# Altium footprint library LFCG490.PcbLib: 1 footprints
Each footprint in its own frame and in the unit in brackets; x right, y up, seen from the top. Pads: shape width x height; smd on the part's side, far side on the other; paste and mask are expansions set on the pad; w line width, h text height; cw(c..) or ccw(c..) is an arc to the next point about the centre after c.
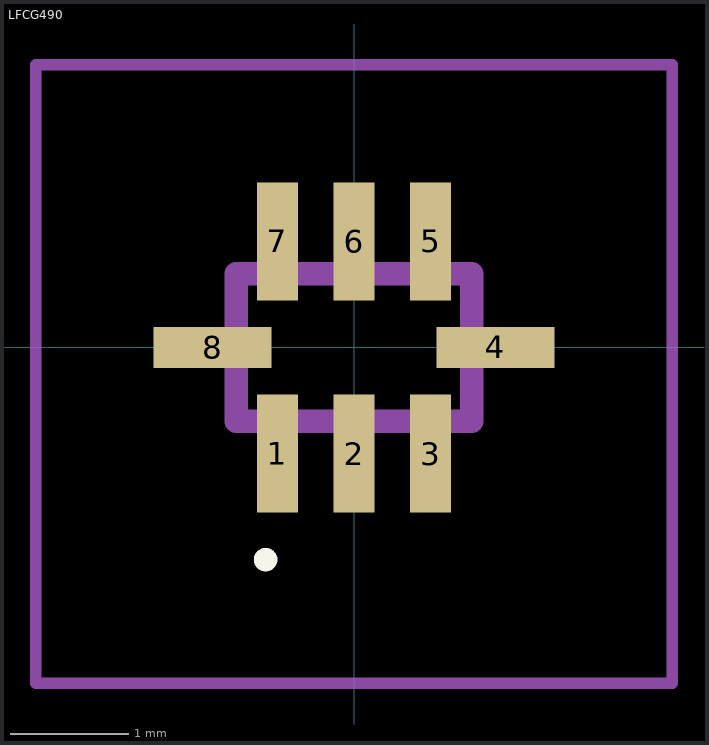
[diagram p0: the footprint, top view; thin cyan lines are the x and y axes]

## LFCG490 [mm]
pads (8):
  rect 0.35x1 smd: 1(-0.65,-0.9) 2(0,-0.9) 3(0.65,-0.9) 5(0.65,0.9) 6(0,0.9) 7(-0.65,0.9)
  rect 1x0.35 smd: 4(1.2,0) 8(-1.2,0)
Top Overlay:
  lines w0.1: -0.8,-1.8 -0.8,-1.8 ; -0.8,-1.8 ccw(c-0.75,-1.8) -0.7,-1.8 ; -0.8,-1.8 cw(c-0.75,-1.8) -0.7,-1.8 ; -0.7,-1.8 -0.7,-1.8
Mechanical 15:
  lines w0.2: -1,-0.625 1,-0.625 1,0.625 -1,0.625 -1,-0.625
Mechanical 20:
  lines w0.1: -2.7,-2.85 2.7,-2.85 2.7,2.4 -2.7,2.4 -2.7,-2.85